# Altium schematic symbol library FH12-22S-0.5SVA_54_.SchLib: 1 symbol
Pins are listed as number, name and electrical type; pins without a type are passive.

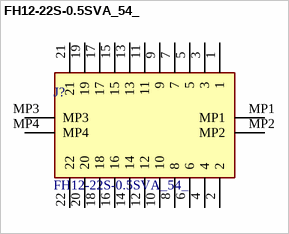
[diagram p0: symbol FH12-22S-0.5SVA_54_]

## FH12-22S-0.5SVA_54_
designator J?
CONN FFC VERT 22POS 0.50MM SMD; Manufacturer_Name: Hirose; Manufacturer_Part_Number: FH12-22S-0.5SVA(54); Geometry.Height: 5.7mm; Mouser Part Number: 798-FH1222S0.5SVA54; Mouser Price/Stock: https://www.mouser.co.uk/ProductDetail/Hirose-Connector/FH12-22S-0.5SVA54?qs=Gufeu08L%2Fl2Z7MeB1X5%252BAA%3D%3D; Arrow Part Number: *; Arrow Price/Stock: *; Datasheet Link: https://www.hirose.com/en/product/document?clcode=CL0586-0813-6-54&productname=FH12-22S-0.5SVA(54)&series=FH12&documenttype=Catalog&lang=en&documentid=D31648_en
footprint FH1222S05SVA54
pins: 1, 2, 3, 4, 5, 6, 7, 8, 9, 10, 11, 12, 13, 14, 15, 16, 17, 18, 19, 20, 21, 22, MP1, MP2, MP3, MP4